# Altium schematic symbol library VJ0805G106MXQTW1BC.SchLib: 1 symbol
Pins are listed as number, name and electrical type; pins without a type are passive.

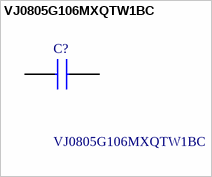
[diagram p0: symbol VJ0805G106MXQTW1BC]

## VJ0805G106MXQTW1BC
designator C?
Multilayer Ceramic Capacitors MLCC - SMD/SMT 0805 10uF 10volts X5R 20%; Manufacturer_Name: Vishay Precision Group; Geometry.Height: 1.45mm; Mouser Part Number: *; Mouser Price/Stock: *; Manufacturer_Part_Number: VJ0805G106MXQTW1BC; Datasheet Link: https://www.vishay.com/docs/28548/vjw1bcbascomseries.pdf
footprint CAPC2012X145N
pins: 1, 2